# Altium footprint library DATALOGER_RevA.PcbLib: 37 footprints (part 3 of 3)
Each footprint in its own frame and in the unit in brackets; x right, y up, seen from the top. Pads: shape width x height; smd on the part's side, far side on the other; paste and mask are expansions set on the pad; w line width, h text height; cw(c..) or ccw(c..) is an arc to the next point about the centre after c.
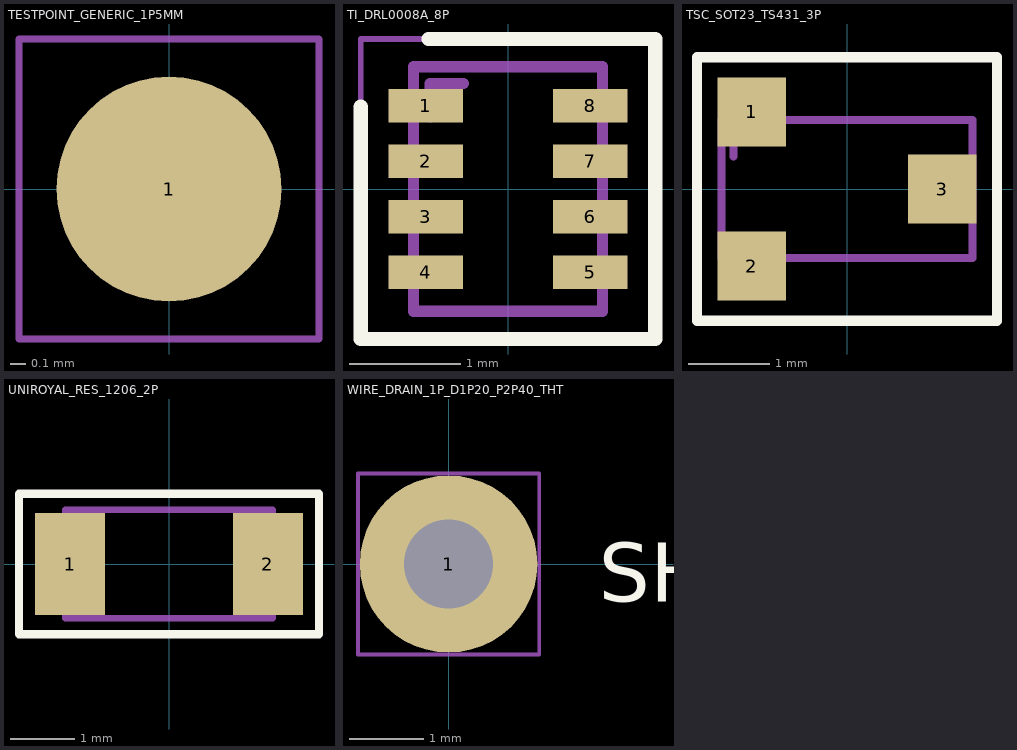
[diagram p2: the footprints below, top view; thin cyan lines are the x and y axes]

## TESTPOINT_GENERIC_1P5MM [mm] "Datalogger Rev-A G013"
pads (1):
  round 1.5 smd paste-0.75 mask+0: 1(0,0)
Top Courtyard:
  lines w0.05: -1,-1 1,-1 1,1 -1,1 -1,-1

## TI_DRL0008A_8P [mm] "Datalogger Rev-A G001"
pads (8):
  rect 0.67x0.3 smd paste+0: 1(-0.74,0.75) 2(-0.74,0.25) 3(-0.74,-0.25) 4(-0.74,-0.75) 5(0.74,-0.75) 6(0.74,-0.25) 7(0.74,0.25) 8(0.74,0.75)
Top Overlay:
  lines w0.127: -1.325,0.74 -1.325,-1.35 1.325,-1.35 1.325,1.35 -0.715,1.35
Mechanical 1:
  lines w0.1: -0.7,0.65 -0.7,0.95 -0.4,0.95 ; -0.85,-1.1 0.85,-1.1 0.85,1.1 -0.85,1.1 -0.85,-1.1
Top Courtyard:
  lines w0.05: -1.325,-1.35 1.325,-1.35 1.325,1.35 -1.325,1.35 -1.325,-1.35

## TSC_SOT23_TS431_3P [mm] "Datalogger Rev-A G005"
pads (3):
  rect 0.85x0.85 smd paste+0: 1(-1.175,0.95) 2(-1.175,-0.95) 3(1.175,0)
Top Overlay:
  lines w0.127: -1.85,-1.625 -1.85,1.625 1.85,1.625 1.85,-1.625 -1.85,-1.625
Mechanical 1:
  lines w0.1: -1.4,0.4 -1.4,0.7 -1.1,0.7 ; -1.55,-0.85 1.55,-0.85 1.55,0.85 -1.55,0.85 -1.55,-0.85
Top Courtyard:
  lines w0.05: -1.85,-1.625 1.85,-1.625 1.85,1.625 -1.85,1.625 -1.85,-1.625

## UNIROYAL_RES_1206_2P [mm] "Datalogger Rev-A G012"
pads (2):
  rect 1.1x1.6 smd paste+0: 1(-1.55,0) 2(1.55,0)
Top Overlay:
  lines w0.127: -2.35,-1.1 -2.35,1.1 2.35,1.1 2.35,-1.1 -2.35,-1.1
Mechanical 1:
  lines w0.1: -1.625,-0.85 1.625,-0.85 1.625,0.85 -1.625,0.85 -1.625,-0.85
Top Courtyard:
  lines w0.05: -2.35,-1.1 2.35,-1.1 2.35,1.1 -2.35,1.1 -2.35,-1.1

## WIRE_DRAIN_1P_D1P20_P2P40_THT [mm] "Task20 dedicated shield/drain wire THT solder pad"
pads (1):
  round 2.4 hole 1.2 paste-2539.97: 1(0,0)
Top Overlay:
  text "SHIELD" at 2.032,-0.508 h0.8
Top Courtyard:
  lines w0.05: -1.225,-1.225 1.225,-1.225 1.225,1.225 -1.225,1.225 -1.225,-1.225